# Altium footprint library Mechanical.PcbLib: 23 footprints (part 2 of 2)
Each footprint in its own frame and in the unit in brackets; x right, y up, seen from the top. Pads: shape width x height; smd on the part's side, far side on the other; paste and mask are expansions set on the pad; w line width, h text height; cw(c..) or ccw(c..) is an arc to the next point about the centre after c.
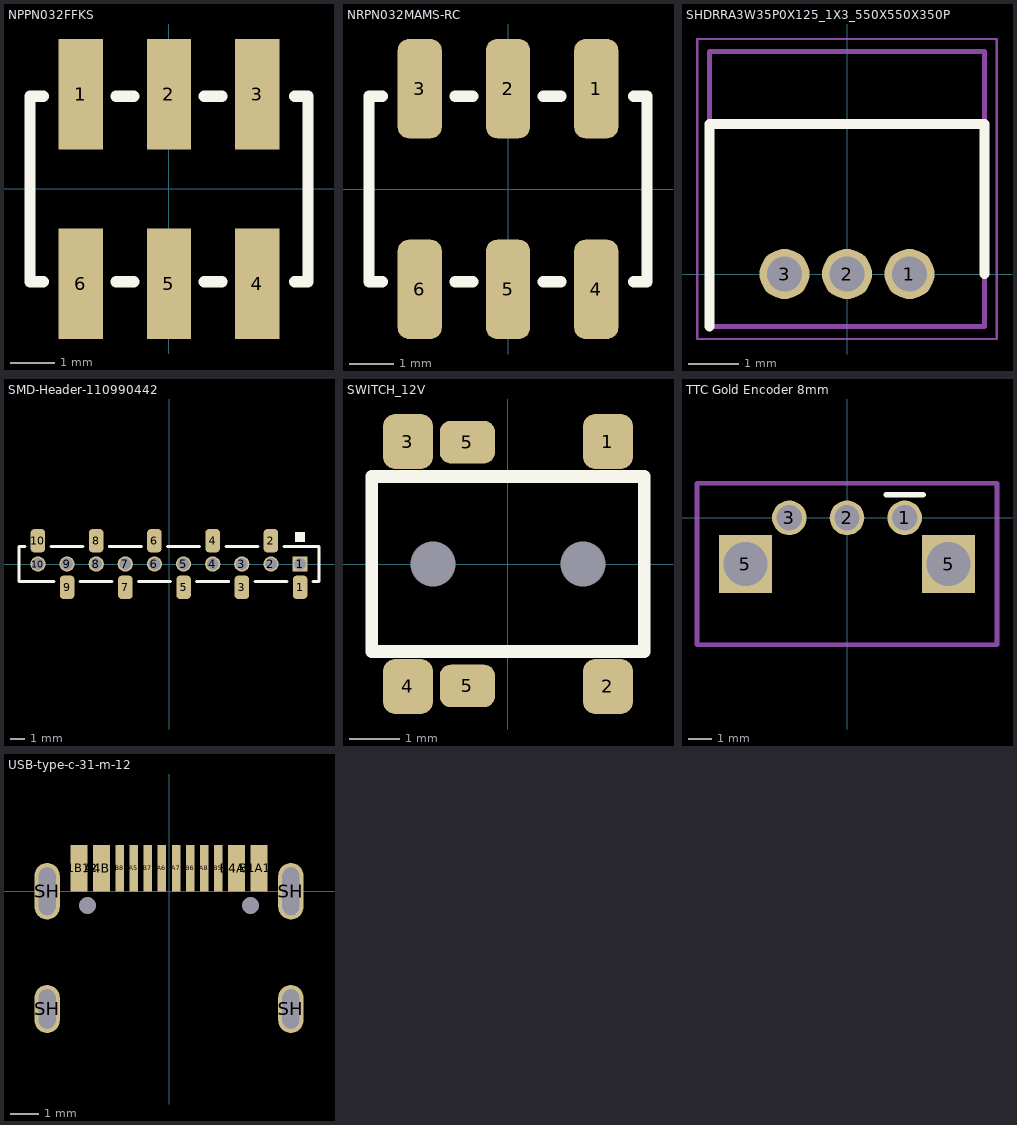
[diagram p1: the footprints below, top view; thin cyan lines are the x and y axes]

## NPPN032FFKS [mm] "smd header 3x2"
pads (6):
  rect 1x2.5 smd: 1(-2,2.15) 2(0,2.15) 3(2,2.15) 4(2,-2.15) 5(0,-2.15) 6(-2,-2.15)
Top Overlay:
  lines w0.254: -2.851,-2.1 -3.15,-2.1 -3.15,2.1 -2.851,2.1 ; -1.2,-2.1 -0.8,-2.1 ; -1.2,2.1 -0.8,2.1 ; 0.8,-2.1 1.2,-2.1 ; 0.8,2.1 1.2,2.1 ; 2.851,-2.1 3.15,-2.1 3.15,2.1 2.851,2.1
3D body "NPPN032FFKS v3.step": height 4.4, standoff 0, extent -3,-2.9 3,2.9

## NRPN032MAMS-RC [mm] "CONN HEADER SMD 6POS 2MM"
pads (6):
  rrect50% 1x2.25 smd mask+0.035: 1(2,2.275) 2(0,2.275) 3(-2,2.275) 4(2,-2.275) 5(0,-2.275) 6(-2,-2.275)
Top Overlay:
  lines w0.254: -2.851,-2.1 -3.15,-2.1 -3.15,2.1 -2.851,2.1 ; -1.2,-2.1 -0.8,-2.1 ; -1.2,2.1 -0.8,2.1 ; 0.8,-2.1 1.2,-2.1 ; 0.8,2.1 1.2,2.1 ; 2.851,-2.1 3.15,-2.1 3.15,2.1 2.851,2.1
3D body "NRPN032MAMS-RC.step": height 5.95, standoff 0, extent -3,-3.25 3,3.25

## SHDRRA3W35P0X125_1X3_550X550X350P [mm]
pads (3):
  round 1 hole 0.7 mask+0.035: 1(1.25,0) 2(0,0) 3(-1.25,0)
Top Overlay:
  lines w0.2: -2.75,-1.05 -2.75,3 2.75,3 2.75,0
Mechanical 13:
  lines w0.1: -2.75,-1.05 -2.75,4.45 2.75,4.45 2.75,-1.05 -2.75,-1.05
Mechanical 15:
  lines w0.05: -3,-1.3 -3,4.7 3,4.7 3,-1.3 -3,-1.3
3D body "53048-0310.stp": height 3.32, standoff -2.48, extent -2.75,-1.055 2.75,4.445

## SMD-Header-110990442 [mm] "10pos, 20x2x3mm, pitch 2mm, female SMD header"
pads (20):
  rrect50% 1x1.6 smd: 1(9,-1.6) 2(7,1.6) 3(5,-1.6) 4(3,1.6) 5(1,-1.6) 6(-1,1.6) 7(-3,-1.6) 8(-5,1.6) 9(-7,-1.6) 10(-9,1.6)
  rect 1.05x1.05 hole 0.8: 1(9,0)
  round 1.05 hole 0.8: 2(7,0) 3(5,0) 4(3,0) 5(1,0) 6(-1,0) 7(-3,0) 8(-5,0) 9(-7,0) 10(-9,0)
Top Overlay:
  rectangle: 8.65,1.5 9.35,2.2
  lines w0.2: -9.9,1.205 -10.3,1.205 -10.3,-1.205 -7.9,-1.205 ; -8.1,1.205 -5.9,1.205 ; -6.1,-1.205 -3.9,-1.205 ; -4.1,1.205 -1.9,1.205 ; -2.1,-1.205 0.1,-1.205 ; -0.1,1.205 2.1,1.205 ; 1.9,-1.205 4.1,-1.205 ; 3.9,1.205 6.1,1.205 ; 5.9,-1.205 8.1,-1.205 ; 7.9,1.205 10.3,1.205 10.3,-1.205 9.9,-1.205
3D body "female-deck-connector v4.step": height 2.3, standoff 0, extent -10.25,-2.148 10.25,2.148

## SWITCH_12V [mm] "plunger style switch"
pads (8):
  rrect50% 1x1.1 smd: 1(2,2.45) 2(2,-2.45) 3(-2,2.45) 4(-2,-2.45)
  rrect50% 1.1x0.85 smd: 5(-0.813,-2.438) 5(-0.813,2.438)
  round 0 hole 0.9 unplated paste-2539.97 mask+0: 11(-1.5,0) 11(1.5,0)
Top Overlay:
  lines w0.254: -2.725,-1.75 2.725,-1.75 2.725,1.75 -2.725,1.75 -2.725,-1.75
3D body "Switch v8.step": height 1.9, standoff -0.4, extent -2.875,-2.724 5.375,2.775

## TTC Gold Encoder 8mm [mm] "Mouse scroll wheel encoder 8mm"
pads (5):
  round 1.5 hole 1.1 mask+0.04: 1(2.5,0) 2(0,0) 3(-2.5,0)
  rect 2.3x2.5 hole 1.9 square mask+0.04: 5(-4.4,-2) 5(4.4,-2)
Top Overlay:
  lines w0.254: 1.7,1 3.3,1
Mechanical 15:
  lines w0.2: -6.5,-5.5 6.5,-5.5 6.5,1.5 -6.5,1.5 -6.5,-5.5
3D body "TTC-8mm-Encoder.step": height 11.83, standoff -2.66, extent -5.602,-4.52 5.602,0.75

## USB-type-c-31-m-12 [mm] "5A 1 16P Female Type-C SMD USB Connectors ROHS"
pads (18):
  oval 0x0.6 hole 0.6 unplated paste-2539.97 mask+0: 11(-2.89,-0.5) 12(2.89,-0.5)
  rect 0.6x1.64 smd paste-0.03 mask+0.04: A1B12(-3.2,0.82) A4B9(-2.4,0.82) B1A12(3.2,0.82) B4A9(2.4,0.82)
  rect 0.3x1.64 smd paste-0.03 mask+0.04: A5(-1.25,0.82) A6(-0.25,0.82) A7(0.25,0.82) A8(1.25,0.82) B5(1.75,0.82) B6(0.75,0.82) B7(-0.75,0.82) B8(-1.75,0.82)
  oval 0.9x1.7 hole 0.6 slot 1.4 at 90 deg mask+0.04: SH(-4.325,-4.18) SH(4.325,-4.18)
  oval 0.9x2 hole 0.6 slot 1.7 at 90 deg mask+0.04: SH(-4.325,0) SH(4.325,0)
3D body "12402012E212A.stp": height 3.18, standoff -0.99, extent -4.47,-6.85 4.47,0.75